# Altium footprint library Resistor.PcbLib: 85 footprints (part 2 of 6)
Each footprint in its own frame and in the unit in brackets; x right, y up, seen from the top. Pads: shape width x height; smd on the part's side, far side on the other; paste and mask are expansions set on the pad; w line width, h text height; cw(c..) or ccw(c..) is an arc to the next point about the centre after c.
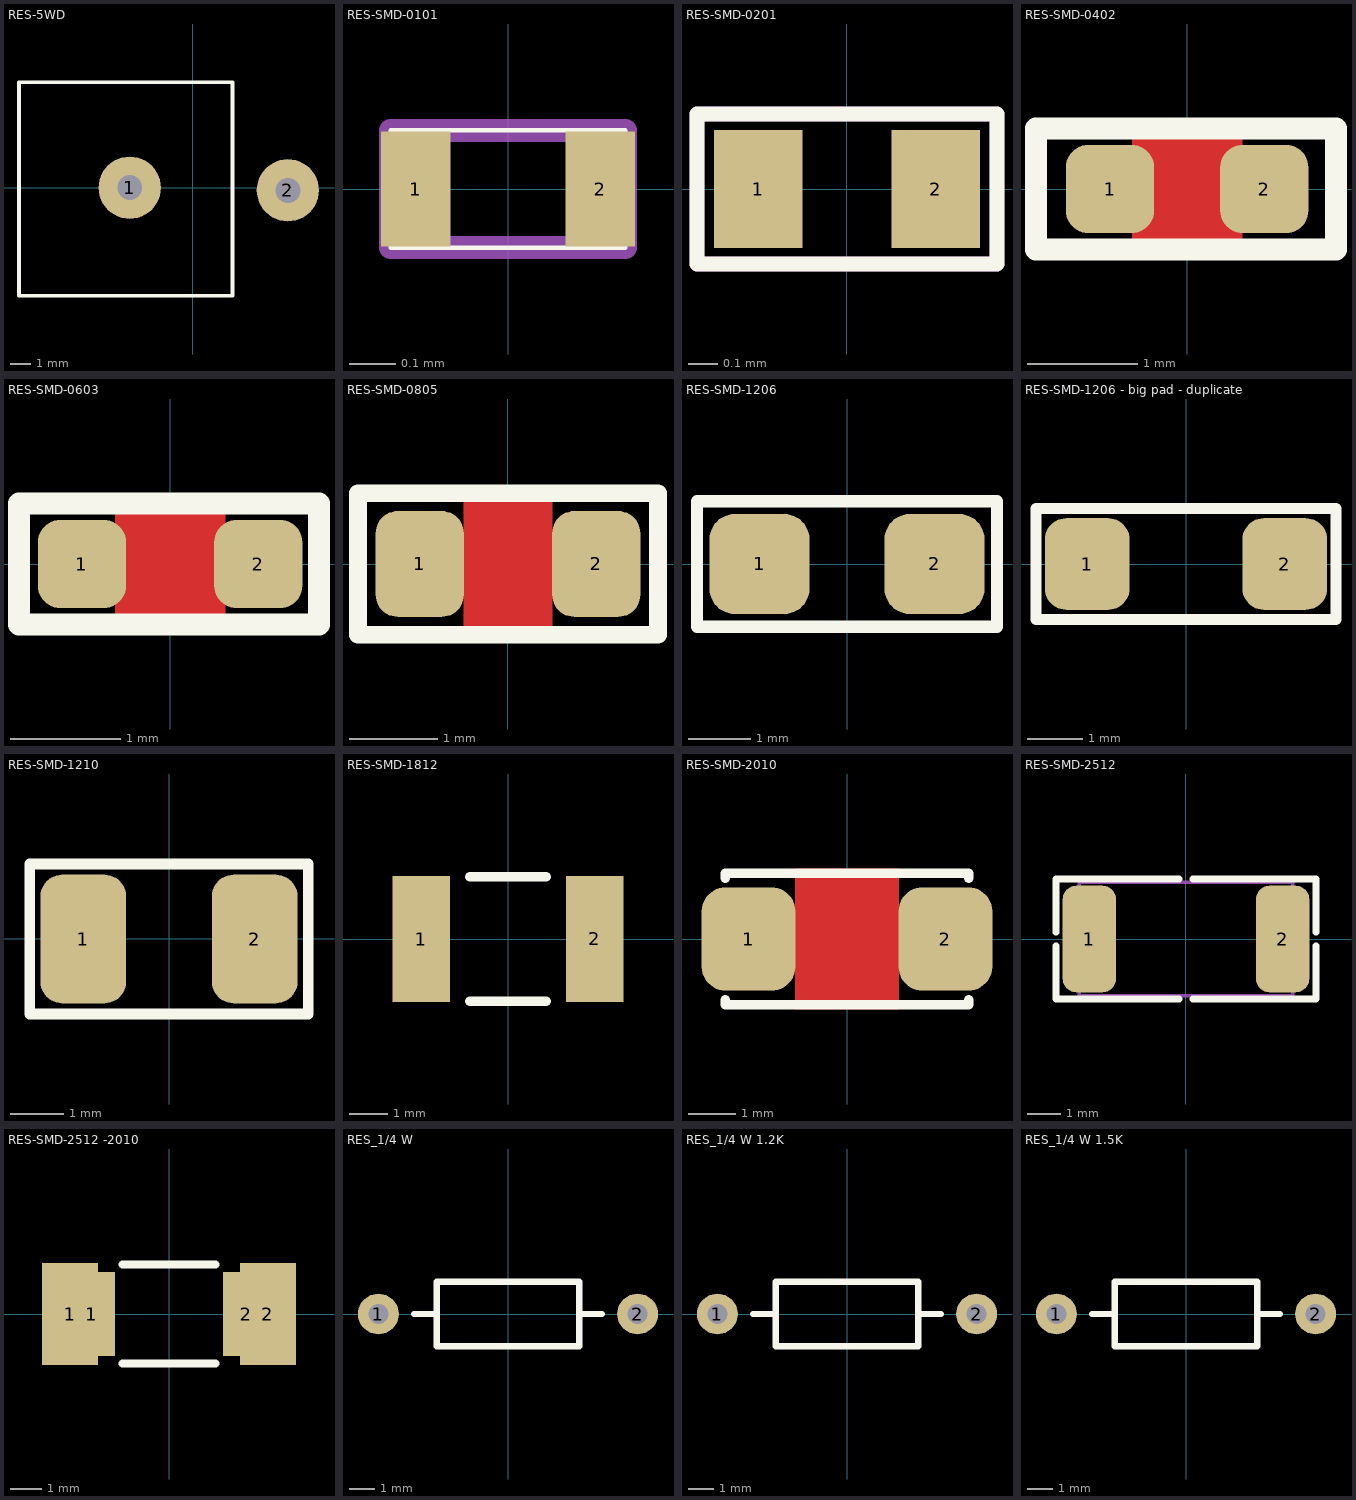
[diagram p1: the footprints below, top view; thin cyan lines are the x and y axes]

## RES-5WD [mm] "R5W , 2 pin, 300 x 600 mil"
height 10.16
pads (2):
  round 3 hole 1.2: 1(-3.048,0) 2(4.572,-0.127)
Top Overlay:
  lines w0.178: -8.382,-5.207 -8.382,5.08 1.905,5.08 1.905,-5.207 -8.382,-5.207
Top Designator:
  text ".Designator" at -4.859,-0.407 h1.52
3D body "SW3dPS-5W Res.STEP": height 23.05, standoff -2.4, extent -8.191,-5.047 4.889,4.953

## RES-SMD-0101 [mm]
pads (2):
  rect 0.15x0.25 smd: 1(-0.2,0) 2(0.2,0)
Top Overlay:
  lines w0.01: -0.254,-0.127 -0.254,0.127 -0.127,0.127 0.254,0.127 0.254,-0.127 -0.254,-0.127
Top Designator:
  text ".Designator" at -3.71,-0.344 h1.52
Mechanical 15:
  lines w0.05: -0.254,-0.127 0.254,-0.127 0.254,0.127 -0.254,0.127 -0.254,-0.127
3D body "User Library-SMD RESISTOR-1.step": height 0.12, standoff -0.02, extent -0.2,-0.1 0.2,0.1

## RES-SMD-0201 [mm]
pads (2):
  rect 0.3x0.4 smd: 1(-0.3,0) 2(0.3,0)
Top Overlay:
  lines w0.05: -0.508,-0.254 0.508,-0.254 0.508,0.254 -0.508,0.254 -0.508,-0.254
Top Designator:
  text ".Designator" at -3.71,-0.344 h1.52
Mechanical 15:
  lines w0.05: -0.508,-0.254 0.508,-0.254 0.508,0.254 -0.508,0.254 -0.508,-0.254
3D body "User Library-SMD RESISTOR-1 (1).step": height 0.22, standoff -0.02, extent -0.3,-0.15 0.3,0.15

## RES-SMD-0402 [mm]
pads (2):
  rrect50% 0.8x0.8 smd: 1(-0.7,0)
  rrect50% 0.8x0.8 smd mask+0.075: 2(0.7,0)
Top Layer:
  pour cut-out: -0.5,0.48 0.5,0.48 0.5,-0.474 -0.5,-0.474
Top Overlay:
  lines w0.2: -1.372,-0.55 -1.372,0.55 1.351,0.55 1.351,-0.55 -1.372,-0.55
Top Designator:
  text ".Designator" at -3.721,-0.344 h1.52
Mechanical 15:
  lines w0.127: -1.372,-0.55 -1.372,0.55 1.351,0.55 1.351,-0.55 -1.372,-0.55
3D body "Resistor 0402.step": height 0.35, standoff 0, extent -0.75,-0.246 0.75,0.254

## RES-SMD-0603 [mm]
pads (2):
  rrect50% 0.8x0.8 smd: 1(-0.8,0)
  rrect50% 0.8x0.8 smd mask+0.075: 2(0.8,0)
Top Layer:
  pour cut-out: -0.5,0.48 0.5,0.48 0.5,-0.474 -0.5,-0.474
Top Overlay:
  lines w0.2: -1.372,-0.55 1.351,-0.55 1.351,0.55 -1.372,0.55 -1.372,-0.55
Top Designator:
  text ".Designator" at -3.721,-0.344 h1.52
Mechanical 15:
  lines w0.127: -1.372,-0.55 1.351,-0.55 1.351,0.55 -1.372,0.55 -1.372,-0.55
3D body "User Library-SMD RESISTOR-1 (3).step": height 0.43, standoff -0.03, extent -0.817,-0.4 0.783,0.4

## RES-SMD-0805 [mm]
pads (2):
  rrect50% 1x1.2 smd paste-0.1 mask+0.075: 1(-1,0) 2(1,0)
Top Layer:
  pour cut-out: -0.5,0.697 0.5,0.697 0.5,-0.713 -0.5,-0.713
Top Overlay:
  lines w0.2: -1.7,-0.8 1.7,-0.8 1.7,0.8 -1.7,0.8 -1.7,-0.8
Top Designator:
  text ".Designator" at -3.71,-0.344 h1.52
Mechanical 15:
  lines w0.127: -1.7,-0.8 1.7,-0.8 1.7,0.8 -1.7,0.8 -1.7,-0.8
3D body "User Library-RES_2013-0805.step": height 0.76, standoff 0, extent -1.15,-0.675 1.15,0.675

## RES-SMD-1206 [mm]
pads (2):
  rrect50% 1.6x1.6 smd paste-0.1 mask+0.075: 1(-1.4,0) 2(1.4,0)
Top Overlay:
  lines w0.2: -2.4,-1 2.4,-1 2.4,1 -2.4,1 -2.4,-1
Top Designator:
  text ".Designator" at -3.71,-0.344 h1.52
3D body "User Library-RES_3216-1206.step": height 0.85, standoff 0, extent -1.675,-0.865 1.675,0.865

## RES-SMD-1206 - big pad - duplicate [mil]
pads (2):
  rrect50% 60x65 smd: 1(-70,0) 2(70,0)
Top Overlay:
  lines w7.87: -106.3,-39.37 106.3,-39.37 106.3,39.37 -106.3,39.37 -106.3,-39.37
Top Designator:
  text ".Designator" at -146.08,-13.54 h60
3D body "User Library-RES_3216-1206.step": height 33.46, standoff 0, extent -65.94,-34.05 65.95,34.06

## RES-SMD-1210 [mm] "Chip Capacitor, Body 3.2x2.5mm, IPC Medium Density"
height 1.35
pads (2):
  rrect50% 1.6x2.4 smd paste-0.2 mask+0.075: 1(-1.6,0) 2(1.6,0)
Top Overlay:
  lines w0.2: -2.6,-1.4 2.6,-1.4 2.6,1.4 -2.6,1.4 -2.6,-1.4
Top Designator:
  text ".Designator" at -3.71,-0.344 h1.52
3D body "RES 1210 (3225 metric).STEP": height 0.69, standoff -0.01, extent -1.7,-1.35 1.7,1.35

## RES-SMD-1812 [mm] "Chip Capacitor, Body 3.2x2.5mm, IPC Medium Density"
height 1.35
pads (2):
  rect 1.5x3.3 smd: 1(-2.268,0) 2(2.268,0)
Top Overlay:
  lines w0.254: -1,-1.625 1,-1.625 ; -1,1.625 1,1.625
Top Designator:
  text ".Designator" at -3.71,-0.344 h1.52
3D body "User Library-SMD RESISTOR-1 (7).step": height 0.6, standoff 0, extent -2.268,-1.6 2.232,1.6

## RES-SMD-2010 [mm] "Chip Capacitor, Body 3.2x2.5mm, IPC Medium Density"
height 1.35
pads (2):
  rrect50% 2x2.2 smd: 1(-2.1,0) 2(2.1,0)
Top Layer:
  pour cut-out: -1.1,1.5 1.1,1.5 1.1,-1.5 -1.1,-1.5
Top Overlay:
  lines w0.2: -2.6,-1.3 -2.6,-1.4 2.6,-1.4 2.6,-1.3 ; -2.6,1.3 -2.6,1.4 2.6,1.4 2.6,1.3
Top Designator:
  text ".Designator" at -3.71,-0.344 h1.52
3D body "User Library-R_2010.step": height 0.6, standoff 0, extent -2.5,-1.25 2.5,1.25

## RES-SMD-2512 [mm] "Chip Capacitor, Body 3.2x2.5mm, IPC Medium Density"
height 1.35
pads (2):
  rrect50% 1.6x3.2 smd: 1(-2.9,0) 2(2.9,0)
Top Overlay:
  lines w0.2: -3.9,-0.2 -3.9,-1.8 -0.2,-1.8 ; -3.9,0.2 -3.9,1.8 -0.2,1.8 ; 0.2,-1.8 3.9,-1.8 3.9,-0.2 ; 0.2,1.8 3.9,1.8 3.9,0.2
Top Designator:
  text ".Designator" at -3.71,-0.344 h1.52
Mechanical 13:
  lines w0.1: -3.2,-1.7 -3.2,1.7 3.2,1.7 3.2,-1.7 -3.2,-1.7
3D body "User Library-SMD RESISTOR-1 (9).step": height 0.6, standoff 0, extent -3.2,-1.6 3.2,1.6

## RES-SMD-2512 -2010 [mm] "Chip Capacitor, Body 3.2x2.5mm, IPC Medium Density"
height 1.35
pads (4):
  rect 1.8x3.3 smd: 1(-3.2,0) 2(3.2,0)
  rect 1.5x2.7 smd: 1(-2.5,0) 2(2.5,0)
Top Overlay:
  lines w0.254: -1.5,-1.6 1.5,-1.6 ; -1.5,1.6 1.5,1.6
Top Designator:
  text ".Designator" at -3.71,-0.344 h1.52
3D body "User Library-SMD RESISTOR-1 (9).step": height 0.6, standoff 0, extent -3.2,-1.6 3.2,1.6

## RES_1/4 W [mm]
pads (2):
  round 1.6 hole 0.787: 1(-5.08,0) 2(5.08,0)
Top Overlay:
  lines w0.254: -3.683,0 -2.794,0 ; 2.794,0 3.683,0 ; -2.794,-1.27 2.794,-1.27 2.794,1.27 -2.794,1.27 -2.794,-1.27
Top Designator:
  text ".Designator" at -3.71,-0.344 h1.52
3D body "User Library-Res40-Axial 0_25W-1R.STEP": height 2.49, standoff -1.92, extent -5.38,-1.191 5.38,1.191

## RES_1/4 W 1.2K [mm]
pads (2):
  round 1.6 hole 0.787: 1(-5.08,0) 2(5.08,0)
Top Overlay:
  lines w0.254: -3.683,0 -2.794,0 ; 2.794,0 3.683,0 ; -2.794,-1.27 2.794,-1.27 2.794,1.27 -2.794,1.27 -2.794,-1.27
Top Designator:
  text ".Designator" at -3.71,-0.344 h1.52
3D body "1K2.step": height 2.51, standoff -2, extent -5.255,-1.151 5.255,1.152

## RES_1/4 W 1.5K [mm]
pads (2):
  round 1.6 hole 0.787: 1(-5.08,0) 2(5.08,0)
Top Overlay:
  lines w0.254: -3.683,0 -2.794,0 ; 2.794,0 3.683,0 ; -2.794,-1.27 -2.794,1.27 2.794,1.27 2.794,-1.27 -2.794,-1.27
Top Designator:
  text ".Designator" at -3.71,-0.344 h1.52
3D body "1K5.step": height 2.51, standoff -2, extent -5.255,-1.151 5.255,1.152